# Altium footprint library 61300511121.PcbLib: 1 footprints
Each footprint in its own frame and in the unit in brackets; x right, y up, seen from the top. Pads: shape width x height; smd on the part's side, far side on the other; paste and mask are expansions set on the pad; w line width, h text height; cw(c..) or ccw(c..) is an arc to the next point about the centre after c.
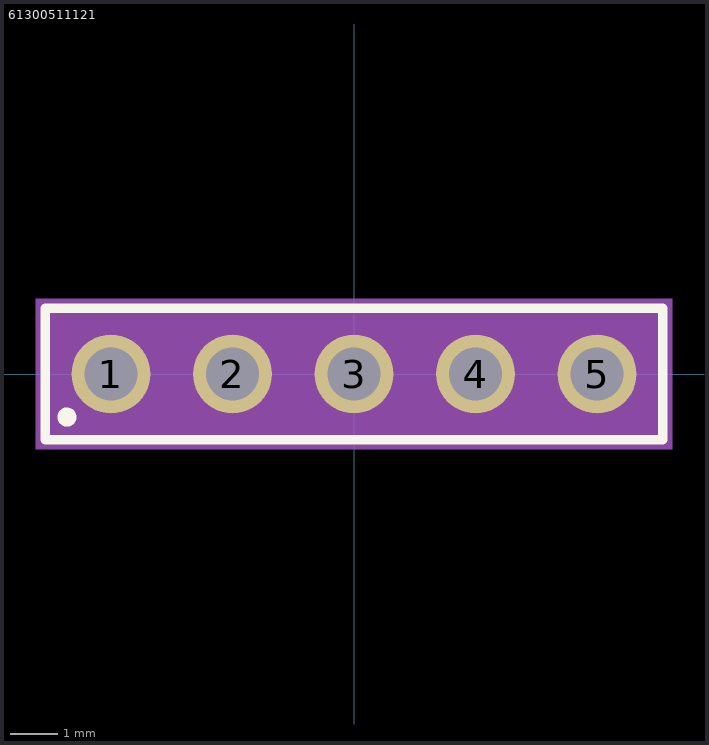
[diagram p0: the footprint, top view; thin cyan lines are the x and y axes]

## 61300511121 [mm]
pads (5):
  round 1.65 hole 1.1: 1(-5.08,0) 2(-2.54,0) 3(0,0) 4(2.54,0) 5(5.08,0)
Top Overlay:
  circle w0.2: c-6,-0.9 r0.1
  lines w0.2: -6.45,-1.37 6.45,-1.37 6.45,1.37 -6.45,1.37 -6.45,-1.37
Assembly Top:
  lines w0.1: -6.35,-1.27 -6.35,1.27 6.35,1.27 6.35,-1.27 -6.35,-1.27
Courtyard Top:
  region: 6.65,-1.57 -6.65,-1.57 -6.65,1.57 6.65,1.57